# Altium footprint library ESP32_HMI1.PcbLib: 33 footprints (part 1 of 3)
Each footprint in its own frame and in the unit in brackets; x right, y up, seen from the top. Pads: shape width x height; smd on the part's side, far side on the other; paste and mask are expansions set on the pad; w line width, h text height; cw(c..) or ccw(c..) is an arc to the next point about the centre after c.
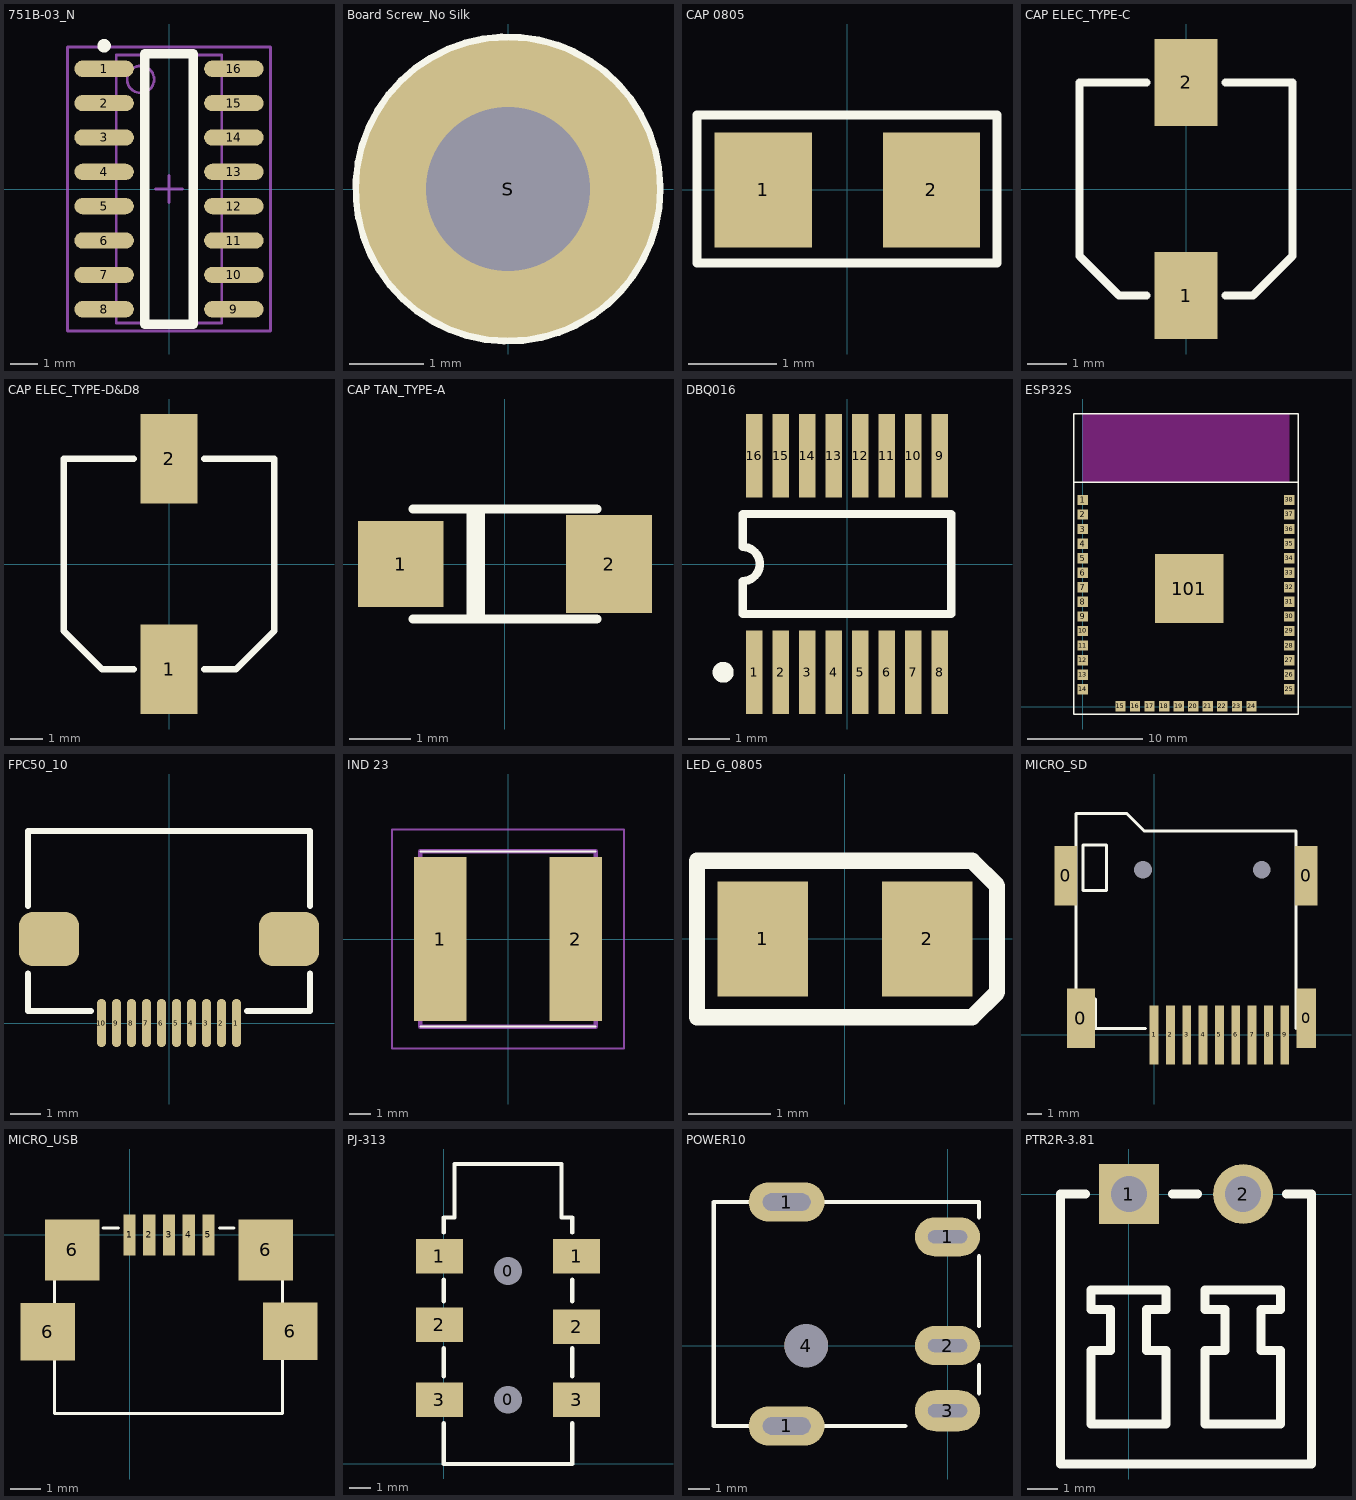
[diagram p0: the footprints below, top view; thin cyan lines are the x and y axes]

## 751B-03_N [mm] "SOIC, 16-Leads, Body 9.9x3.9mm, Pitch 1.27mm, IPC Medium Density"
height 1.75
pads (16):
  oval 2.2x0.6 smd: 1(-2.4,4.445) 2(-2.4,3.175) 3(-2.4,1.905) 4(-2.4,0.635) 5(-2.4,-0.635) 6(-2.4,-1.905) 7(-2.4,-3.175) 8(-2.4,-4.445) 9(2.4,-4.445) 10(2.4,-3.175) 11(2.4,-1.905) 12(2.4,-0.635) 13(2.4,0.635) 14(2.4,1.905) 15(2.4,3.175) 16(2.4,4.445)
Top Overlay:
  circle w0.25: c-2.4,5.295 r0.125
  lines w0.35: -0.9,-5 0.9,-5 0.9,5 -0.9,5 -0.9,-5
Mechanical 13:
  circle w0.1: c-1.05,4.05 r0.5
  lines w0.1: -1.95,-4.95 1.95,-4.95 1.95,4.95 -1.95,4.95 -1.95,-4.95
Mechanical 15:
  lines w0.1: -0.5,0 0.5,0 ; 0,-0.5 0,0.5 ; -3.75,-5.25 3.75,-5.25 3.75,5.25 -3.75,5.25 -3.75,-5.25
3D body: height 1.75, standoff 0, extent -1.95,-4.95 1.95,4.95

## Board Screw_No Silk [mm]
pads (1):
  round 4 hole 2.2 mask+0.1: S(0,0)
Top Overlay:
  lines w0.15: 2.011,0 cw(c0,0) 2.011,0.031

## CAP 0805 [mm]
height 4.58
pads (2):
  rect 1.1x1.3 smd: 1(-0.95,0) 2(0.95,0)
Top Overlay:
  lines w0.1: -1.7,-0.826 -1.7,0.843 1.691,0.843 1.691,-0.826 -1.7,-0.826
3D body "SW3dPS-0805 SMD Capacitor.STEP": height 0.78, standoff 0, extent -1,-0.625 1,0.625

## CAP ELEC_TYPE-C [mm]
height 4.58
pads (2):
  rect 1.6x2.2 smd: 1(0,-2.7) 2(0,2.7)
Top Overlay:
  lines w0.2: -1,-2.7 -1.7,-2.7 -2.7,-1.7 -2.7,2.7 -1,2.7 ; 1,-2.7 1.7,-2.7 2.7,-1.7 2.7,2.7 1,2.7
3D body "User Library-capacitor size C.STEP": height 5.41, standoff -0.01, extent -2.625,-2.95 2.675,2.95

## CAP ELEC_TYPE-D&D8 [mm]
pads (2):
  rect 1.8x2.8 smd: 1(0,-3.3) 2(0,3.3)
Top Overlay:
  lines w0.2: -1.1,-3.3 -2.1,-3.3 -3.3,-2.1 -3.3,3.3 -1.1,3.3 ; 1.1,-3.3 2.1,-3.3 3.3,-2.1 3.3,3.3 1.1,3.3
3D body "User Library-capacitor size D.STEP": height 5.41, standoff -0.01, extent -3.275,-3.5 3.325,3.5

## CAP TAN_TYPE-A [mm]
pads (2):
  rect 1.4x1.4 smd: 1(-1.7,0)
  rect 1.4x1.6 smd: 2(1.7,0)
Top Overlay:
  lines w0.15: -1.5,-0.9 1.5,-0.9 ; -1.5,0.9 1.5,0.9
  lines w0.3: -0.475,-0.825 -0.475,0.825
3D body "User Library-CAP_TAN_C3216_1206.STEP": height 1.8, standoff 0, extent -1.65,-0.9 1.75,0.9

## DBQ016 [mm] "SSOP; 16 Leads; Body Width 3.9 mm; Pitch 0.635 mm"
height 1.76
pads (16):
  rect 0.4x2 smd: 1(-2.222,-2.6) 2(-1.587,-2.6) 3(-0.953,-2.6) 4(-0.318,-2.6) 5(0.318,-2.6) 6(0.953,-2.6) 7(1.587,-2.6) 8(2.222,-2.6) 9(2.222,2.6) 10(1.587,2.6) 11(0.953,2.6) 12(0.318,2.6) 13(-0.318,2.6) 14(-0.953,2.6) 15(-1.587,2.6) 16(-2.222,2.6)
Top Overlay:
  circle w0.25: c-2.973,-2.6 r0.125
  lines w0.2: -2.5,-1.2 2.5,-1.2 2.5,1.2 -2.5,1.2 -2.5,0.408 cw(c-2.5,0) -2.5,-0.408 -2.5,-1.2
3D body "User Library-AS3933-BTST.STEP": height 1.06, standoff -0.01, extent -2.55,-3.325 2.55,3.175

## ESP32S [mm] "ESP32S-Module"
height 2.8
pads (39):
  rect 0.9x0.9 smd: 1(0,18.034) 2(0,16.764) 3(0,15.494) 4(0,14.224) 5(0,12.954) 6(0,11.684) 7(0,10.414) 8(0,9.144) 9(0,7.874) 10(0,6.604) 11(0,5.334) 12(0,4.064) 13(0,2.794) 14(0,1.524) 15(3.3,0.034) 16(4.57,0.034) 17(5.84,0.034) 18(7.11,0.034) 19(8.38,0.034) 20(9.65,0.034) 21(10.92,0.034) 22(12.19,0.034) 23(13.46,0.034) 24(14.73,0.034) 25(18.034,1.524) 26(18.034,2.794) 27(18.034,4.064) 28(18.034,5.334) 29(18.034,6.604) 30(18.034,7.874) 31(18.034,9.144) 32(18.034,10.414) 33(18.034,11.684) 34(18.034,12.954) 35(18.034,14.224) 36(18.034,15.494) 37(18.034,16.764) 38(18.034,18.034)
  rect 6x6 smd: 101(9.3,10.3)
Top Overlay:
  lines w0.127: -0.762,19.558 18.796,19.558 ; -0.762,-0.635 18.796,-0.635 18.796,25.527 -0.762,25.527 -0.762,-0.635
Keep-Out Layer:
  rectangle: 0,19.558 18.034,25.527
3D body: height 2, standoff 0.8, extent 0.635,0.635 17.526,19.558
3D body: height 0.8, standoff 0, extent 0,0 18.034,25.527

## FPC50_10 [mm] "FPC, 0.50mm, SMT,RA Bot. Contact, WE 687110149022"
height 7.62
pads (12):
  oval 0.3x1.6 smd mask+0.05: 1(2.25,0) 2(1.75,0) 3(1.25,0) 4(0.75,0) 5(0.25,0) 6(-0.25,0) 7(-0.75,0) 8(-1.25,0) 9(-1.75,0) 10(-2.25,0)
  rrect50% 2x1.8 smd: ""(-4,2.8) ""(4,2.8)
Top Overlay:
  lines w0.2: -4.7,1.65 -4.7,0.4 -2.6,0.4 ; -4.7,3.9 -4.7,6.4 4.7,6.4 4.7,3.9 ; 2.6,0.4 4.7,0.4 4.7,1.65
3D body "687110149022.stp": height 2.25, standoff 0, extent -4.55,-0.225 4.55,6.275

## IND 23 [mm]
pads (2):
  rect 2.4x7.5 smd: 1(-3.1,0) 2(3.1,0)
Top Overlay:
  lines w0.1: -4,-4 4,-4 ; -4,4 4,4
Mechanical 13:
  lines w0.2: -4,-4 -4,4 4,4 4,-4 -4,-4
Mechanical 15:
  lines w0.1: -5.3,-5 -5.3,5 5.3,5 5.3,-5 -5.3,-5
3D body "74404086471.stp": height 6.6, standoff 0, extent -4.06,-4 4.06,4

## LED_G_0805 [mm]
pads (2):
  rect 1.1x1.4 smd: 1(-1,0) 2(1,0)
Top Overlay:
  lines w0.2: -1.8,-0.95 -1.8,0.95 1.55,0.95 1.85,0.65 1.85,-0.65 1.55,-0.95 -1.8,-0.95
3D body "everlight-17-21-0805LED-GREEN.STEP": height 0.8, standoff -0.31, extent -1,-0.625 1,0.625

## MICRO_SD [mm]
pads (15):
  rect 1.5x4 smd: 0(-5.95,10.725) 0(10.25,10.725)
  rect 1.9x4 smd: 0(-4.925,1.125)
  round 0 hole 1.2: 0(-0.75,11.125) 0(7.25,11.125)
  rect 1.3x4 smd: 0(10.25,1.125)
  rect 0.6x4 smd: 1(0,0) 2(1.1,0) 3(2.2,0) 4(3.308,0) 5(4.4,0) 6(5.5,0) 7(6.6,0) 8(7.7,0) 9(8.8,0)
Top Overlay:
  lines w0.2: -4.8,12.775 -4.8,9.725 -3.2,9.725 -3.2,12.8 -4.775,12.8
  lines w0.203: -0.575,0.425 -3.95,0.425 -3.95,2.425 -5.25,2.425 -5.25,14.925 -2.25,14.925 -1.85,14.925 -0.65,13.725 9.55,13.725 9.55,8.525 ; 9.55,0.425 9.55,9.027

## MICRO_USB [mm]
height 1.75
pads (9):
  rect 0.4x1.35 smd: 1(0,0) 2(0.65,0) 3(1.3,0) 4(1.95,0) 5(2.6,0)
  rect 1.8x1.9 smd: 6(-2.7,-3.2) 6(5.3,-3.175)
  rect 1.8x2 smd: 6(-1.9,-0.5) 6(4.5,-0.5)
Top Overlay:
  lines w0.1: -2.475,0.225 -2.475,-5.9 5.05,-5.9 5.05,0.225 ; -0.875,0.225 -0.375,0.225 ; 2.975,0.225 3.45,0.225

## PJ-313 [mm]
height 4.58
pads (8):
  round 1 hole 1.3: 0(3,3) 0(3,9)
  rect 2.2x1.6 smd: 1(-0.2,9.7) 1(6.2,9.7) 2(-0.2,6.5) 2(6.2,6.4) 3(-0.2,3) 3(6.2,3)
Top Overlay:
  lines w0.2: 0,1.9 0,0 6,0 6,1.9 ; 0,4.1 0,5.4 ; 0,7.6 0,8.6 ; 0,10.8 0,11.5 0.5,11.5 0.5,14 5.5,14 5.5,11.5 6,11.5 6,10.8 ; 6,4.1 6,5.4 ; 6,7.6 6,8.6
3D body: height 5, standoff 0, extent 0.52,11.5 5.5,14
3D body: height 5, standoff 0, extent 0,0 6,11.5

## POWER10 [mm]
pads (6):
  oval 3.5x1.8 hole 0.8 slot 2.2 at 0 deg: 1(-7.4,-3.7) 1(-7.4,6.6)
  oval 3x1.8 hole 0.6 slot 1.8 at 0 deg: 1(0,5) 2(0,0)
  oval 3x1.9 hole 0.6 slot 1.8 at 0 deg: 3(0,-3)
  oval 2x1.9 hole 2: 4(-6.5,0)
Top Overlay:
  lines w0.2: -1.95,-3.7 -10.75,-3.7 -10.75,6.6 1.45,6.6 1.45,5.9 ; 1.45,-2.2 1.45,-0.9 ; 1.45,0.9 1.45,4.1
3D body "User Library-DC044A.STEP": height 7.2, standoff -3, extent -10.6,-3.5 1.5,6.5

## PTR2R-3.81 [mm]
pads (2):
  rect 2x2 hole 1.2: 1(0,0)
  round 2 hole 1.2: 2(3.81,0)
Top Overlay:
  lines w0.3: -1.453,0 -2.285,0 -2.285,-9 6.095,-9 6.095,0 ; 1.453,0 2.285,0 ; 6.095,0 5.263,0 6.095,0 ; -1.267,-7.673 1.245,-7.673 1.245,-5.212 0.587,-5.212 0.587,-3.848 1.245,-3.848 1.245,-3.195 -1.267,-3.195 -1.267,-3.848 -0.61,-3.848 -0.61,-5.212 -1.267,-5.212 -1.267,-7.673 ; 2.543,-7.673 5.055,-7.673 5.055,-5.212 4.397,-5.212 4.397,-3.848 5.055,-3.848 5.055,-3.195 2.543,-3.195 2.543,-3.848 3.2,-3.848 3.2,-5.212 2.543,-5.212 2.543,-7.673